# Altium schematic symbol library WE-CSIM.SchLib: 12 symbols
Pins are listed as number, name and electrical type; pins without a type are passive.

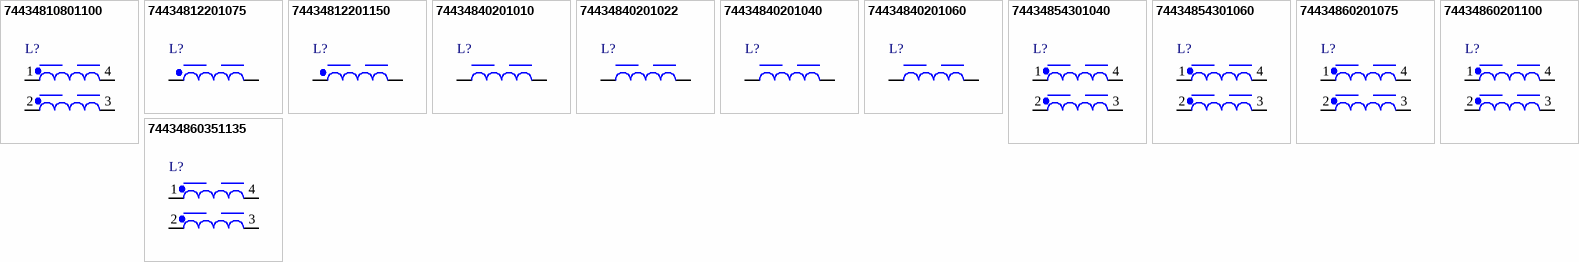
[diagram p0: symbols 74434810801100 to 74434860351135]

## 74434810801100
designator L?, comment 100nH  (value not drawn)
WE-CSIM Co-Sintered Inductor for Multiphase Applications, SMT, size 1080, 100nH, 120A, 0.2mohm; Manufacturer Part Number: 74434810801100; Manufacturer: Wurth Elektronik; Case/Size Code: 1080; DC Resistance: 0.1mohm; Saturation Current @ 30%: 145A; Self Resonant Frequency: 300MHz; Product Series: WE-CSIM; ComponentLink1Description: Website Link; ComponentLink1URL: https://www.we-online.com; ComponentLink2Description: Datasheet Link; ComponentLink2URL: https://www.we-online.com/components/products/datasheet/74434810801100; Mount: Surface Mount; Operating Temperature Min: -55degC; Operating Temperature Max: 155degC; Packaging: Tape and Reel; Length: 8.8mm; Width: 9.8mm; Height: 8mm; DC Resistance Max: 0.2mohm; Inductance: 100nH; Performance Rated Current: 120A
footprint WE-CSIM_1080
pins: 1, 2, 3, 4

## 74434812201075
designator L?, comment 75nH  (value not drawn)
WE-CSIM Co-Sintered Inductor for Multiphase Applications, SMT, size 1220, 75nH, 87A, 0.3mohm; Manufacturer Part Number: 74434812201075; Manufacturer: Wurth Elektronik; Case/Size Code: 1220; DC Resistance: 0.25mohm; Saturation Current @ 30%: 65A; Self Resonant Frequency: 530MHz; Product Series: WE-CSIM; ComponentLink1Description: Website Link; ComponentLink1URL: https://www.we-online.com; ComponentLink2Description: Datasheet Link; ComponentLink2URL: https://www.we-online.com/components/products/datasheet/74434812201075; Mount: Surface Mount; Operating Temperature Min: -55degC; Operating Temperature Max: 155degC; Packaging: Tape and Reel; Length: 11.8mm; Width: 4.6mm; Height: 1.9mm; DC Resistance Max: 0.3mohm; Inductance: 75nH; Performance Rated Current: 87A
footprint WE-CSIM_1220
pins: 1, 2

## 74434812201150
designator L?, comment 150nH  (value not drawn)
WE-CSIM Co-Sintered Inductor for Multiphase Applications, SMT, size 1220, 150nH, 56A, 0.65mohm; Manufacturer Part Number: 74434812201150; Manufacturer: Wurth Elektronik; Case/Size Code: 1220; DC Resistance: 0.6mohm; Saturation Current @ 30%: 37A; Self Resonant Frequency: 350MHz; Product Series: WE-CSIM; ComponentLink1Description: Website Link; ComponentLink1URL: https://www.we-online.com; ComponentLink2Description: Datasheet Link; ComponentLink2URL: https://www.we-online.com/components/products/datasheet/74434812201150; Mount: Surface Mount; Operating Temperature Min: -55degC; Operating Temperature Max: 155degC; Packaging: Tape and Reel; Length: 11.8mm; Width: 4.6mm; Height: 1.9mm; DC Resistance Max: 0.65mohm; Inductance: 150nH; Performance Rated Current: 56A
footprint WE-CSIM_1220
pins: 1, 2

## 74434840201010
designator L?, comment 10nH  (value not drawn)
WE-CSIM Co-Sintered Inductor for Multiphase Applications, SMT, size 4020, 10nH, 60A, 0.1mohm; Manufacturer Part Number: 74434840201010; Manufacturer: Wurth Elektronik; Case/Size Code: 4020; DC Resistance: 0.05mohm; Saturation Current @ 30%: 112A; Self Resonant Frequency: 1800MHz; Product Series: WE-CSIM; ComponentLink1Description: Website Link; ComponentLink1URL: https://www.we-online.com; ComponentLink2Description: Datasheet Link; ComponentLink2URL: https://www.we-online.com/components/products/datasheet/74434840201010; Mount: Surface Mount; Operating Temperature Min: -55degC; Operating Temperature Max: 155degC; Packaging: Tape and Reel; Length: 4mm; Width: 4mm; Height: 2mm; DC Resistance Max: 0.1mohm; Inductance: 10nH; Performance Rated Current: 60A
footprint WE-CSIM_4020
pins: 1, 2

## 74434840201022
designator L?, comment 22nH  (value not drawn)
WE-CSIM Co-Sintered Inductor for Multiphase Applications, SMT, size 4020, 22nH, 55A, 0.15mohm; Manufacturer Part Number: 74434840201022; Manufacturer: Wurth Elektronik; Case/Size Code: 4020; DC Resistance: 0.1mohm; Saturation Current @ 30%: 72A; Self Resonant Frequency: 1000MHz; Product Series: WE-CSIM; ComponentLink1Description: Website Link; ComponentLink1URL: https://www.we-online.com; ComponentLink2Description: Datasheet Link; ComponentLink2URL: https://www.we-online.com/components/products/datasheet/74434840201022; Mount: Surface Mount; Operating Temperature Min: -55degC; Operating Temperature Max: 155degC; Packaging: Tape and Reel; Length: 4mm; Width: 4mm; Height: 2mm; DC Resistance Max: 0.15mohm; Inductance: 22nH; Performance Rated Current: 55A
footprint WE-CSIM_4020
pins: 1, 2

## 74434840201040
designator L?, comment 40nH  (value not drawn)
WE-CSIM Co-Sintered Inductor for Multiphase Applications, SMT, size 4020, 40nH, 50A, 0.2mohm; Manufacturer Part Number: 74434840201040; Manufacturer: Wurth Elektronik; Case/Size Code: 4020; DC Resistance: 0.15mohm; Saturation Current @ 30%: 42A; Self Resonant Frequency: 400MHz; Product Series: WE-CSIM; ComponentLink1Description: Website Link; ComponentLink1URL: https://www.we-online.com; ComponentLink2Description: Datasheet Link; ComponentLink2URL: https://www.we-online.com/components/products/datasheet/74434840201040; Mount: Surface Mount; Operating Temperature Min: -55degC; Operating Temperature Max: 155degC; Packaging: Tape and Reel; Length: 4mm; Width: 4mm; Height: 2mm; DC Resistance Max: 0.2mohm; Inductance: 40nH; Performance Rated Current: 50A
footprint WE-CSIM_4020
pins: 1, 2

## 74434840201060
designator L?, comment 60nH  (value not drawn)
WE-CSIM Co-Sintered Inductor for Multiphase Applications, SMT, size 4020, 60nH, 46A, 0.47mohm; Manufacturer Part Number: 74434840201060; Manufacturer: Wurth Elektronik; Case/Size Code: 4020; DC Resistance: 0.4mohm; Saturation Current @ 30%: 30A; Self Resonant Frequency: 300MHz; Product Series: WE-CSIM; ComponentLink1Description: Website Link; ComponentLink1URL: https://www.we-online.com; ComponentLink2Description: Datasheet Link; ComponentLink2URL: https://www.we-online.com/components/products/datasheet/74434840201060; Mount: Surface Mount; Operating Temperature Min: -55degC; Operating Temperature Max: 155degC; Packaging: Tape and Reel; Length: 4mm; Width: 4mm; Height: 2mm; DC Resistance Max: 0.47mohm; Inductance: 60nH; Performance Rated Current: 46A
footprint WE-CSIM_4020
pins: 1, 2

## 74434854301040
designator L?, comment 40nH  (value not drawn)
WE-CSIM Co-Sintered Inductor for Multiphase Applications, SMT, size 5430, 40nH, 95A, 0.23mohm; Manufacturer Part Number: 74434854301040; Manufacturer: Wurth Elektronik; Case/Size Code: 5430; DC Resistance: 0.19mohm; Saturation Current @ 30%: 50A; Self Resonant Frequency: 440MHz; Product Series: WE-CSIM; ComponentLink1Description: Website Link; ComponentLink1URL: https://www.we-online.com; ComponentLink2Description: Datasheet Link; ComponentLink2URL: https://www.we-online.com/components/products/datasheet/74434854301040; Mount: Surface Mount; Operating Temperature Min: -55degC; Operating Temperature Max: 155degC; Packaging: Tape and Reel; Length: 5.4mm; Width: 4.4mm; Height: 3mm; DC Resistance Max: 0.23mohm; Inductance: 40nH; Performance Rated Current: 95A
footprint WE-CSIM_5430
pins: 1, 2, 3, 4

## 74434854301060
designator L?, comment 60nH  (value not drawn)
WE-CSIM Co-Sintered Inductor for Multiphase Applications, SMT, size 5430, 60nH, 90A, 0.3mohm; Manufacturer Part Number: 74434854301060; Manufacturer: Wurth Elektronik; Case/Size Code: 5430; DC Resistance: 0.25mohm; Saturation Current @ 30%: 35A; Self Resonant Frequency: 310MHz; Product Series: WE-CSIM; ComponentLink1Description: Website Link; ComponentLink1URL: https://www.we-online.com; ComponentLink2Description: Datasheet Link; ComponentLink2URL: https://www.we-online.com/components/products/datasheet/74434854301060; Mount: Surface Mount; Operating Temperature Min: -55degC; Operating Temperature Max: 155degC; Packaging: Tape and Reel; Length: 5.4mm; Width: 4.4mm; Height: 3mm; DC Resistance Max: 0.3mohm; Inductance: 60nH; Performance Rated Current: 90A
footprint WE-CSIM_5430
pins: 1, 2, 3, 4

## 74434860201075
designator L?, comment 75nH  (value not drawn)
WE-CSIM Co-Sintered Inductor for Multiphase Applications, SMT, size 6020, 75nH, 70A, 0.63mohm; Manufacturer Part Number: 74434860201075; Manufacturer: Wurth Elektronik; Case/Size Code: 6020; DC Resistance: 0.55mohm; Saturation Current @ 30%: 38A; Self Resonant Frequency: 480MHz; Product Series: WE-CSIM; ComponentLink1Description: Website Link; ComponentLink1URL: https://www.we-online.com; ComponentLink2Description: Datasheet Link; ComponentLink2URL: https://www.we-online.com/components/products/datasheet/74434860201075; Mount: Surface Mount; Operating Temperature Min: -55degC; Operating Temperature Max: 155degC; Packaging: Tape and Reel; Length: 6mm; Width: 5.9mm; Height: 1.9mm; DC Resistance Max: 0.63mohm; Inductance: 75nH; Performance Rated Current: 70A
footprint WE-CSIM_6020
pins: 1, 2, 3, 4

## 74434860201100
designator L?, comment 100nH  (value not drawn)
WE-CSIM Co-Sintered Inductor for Multiphase Applications, SMT, size 6020, 100nH, 70A, 0.63mohm; Manufacturer Part Number: 74434860201100; Manufacturer: Wurth Elektronik; Case/Size Code: 6020; DC Resistance: 0.6mohm; Saturation Current @ 30%: 27A; Self Resonant Frequency: 310MHz; Product Series: WE-CSIM; ComponentLink1Description: Website Link; ComponentLink1URL: https://www.we-online.com; ComponentLink2Description: Datasheet Link; ComponentLink2URL: https://www.we-online.com/components/products/datasheet/74434860201100; Mount: Surface Mount; Operating Temperature Min: -55degC; Operating Temperature Max: 155degC; Packaging: Tape and Reel; Length: 6mm; Width: 5.9mm; Height: 1.9mm; DC Resistance Max: 0.63mohm; Inductance: 100nH; Performance Rated Current: 70A
footprint WE-CSIM_6020
pins: 1, 2, 3, 4

## 74434860351135
designator L?, comment 135nH  (value not drawn)
WE-CSIM Co-Sintered Inductor for Multiphase Applications, SMT, size 6035, 135nH, 90A, 0.4mohm; Manufacturer Part Number: 74434860351135; Manufacturer: Wurth Elektronik; Case/Size Code: 6035; DC Resistance: 0.3mohm; Saturation Current @ 30%: 36A; Self Resonant Frequency: 240MHz; Product Series: WE-CSIM; ComponentLink1Description: Website Link; ComponentLink1URL: https://www.we-online.com; ComponentLink2Description: Datasheet Link; ComponentLink2URL: https://www.we-online.com/components/products/datasheet/74434860351135; Mount: Surface Mount; Operating Temperature Min: -55degC; Operating Temperature Max: 155degC; Packaging: Tape and Reel; Length: 6mm; Width: 5.9mm; Height: 3.5mm; DC Resistance Max: 0.4mohm; Inductance: 135nH; Performance Rated Current: 90A
footprint WE-CSIM_6035
pins: 1, 2, 3, 4